# Altium schematic symbol library EEETC1C101XV.SchLib: 1 symbol
Pins are listed as number, name and electrical type; pins without a type are passive.

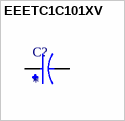
[diagram p0: symbol EEETC1C101XV]

## EEETC1C101XV
designator C?
CAP ALUM 100UF 20% 16V SMD; MF: Panasonic; MP: EEETC1C101XV; Package: RADIAL-2 Panasonic; Price: None; Check_prices: https://www.snapeda.com/parts/EEETC1C101XV/Panasonic/view-part/?ref=eda; Value: *; SnapEDA_Link: https://www.snapeda.com/parts/EEETC1C101XV/Panasonic/view-part/?ref=snap; Availability: In Stock; Purchase-URL: https://pricing.snapeda.com/search/part/EEETC1C101XV/?ref=eda
footprint CAP_EEETC1C101XV
pins: 1, 2